# Altium footprint library PcbLib1.PcbLib: 15 footprints
Each footprint in its own frame and in the unit in brackets; x right, y up, seen from the top. Pads: shape width x height; smd on the part's side, far side on the other; paste and mask are expansions set on the pad; w line width, h text height; cw(c..) or ccw(c..) is an arc to the next point about the centre after c.
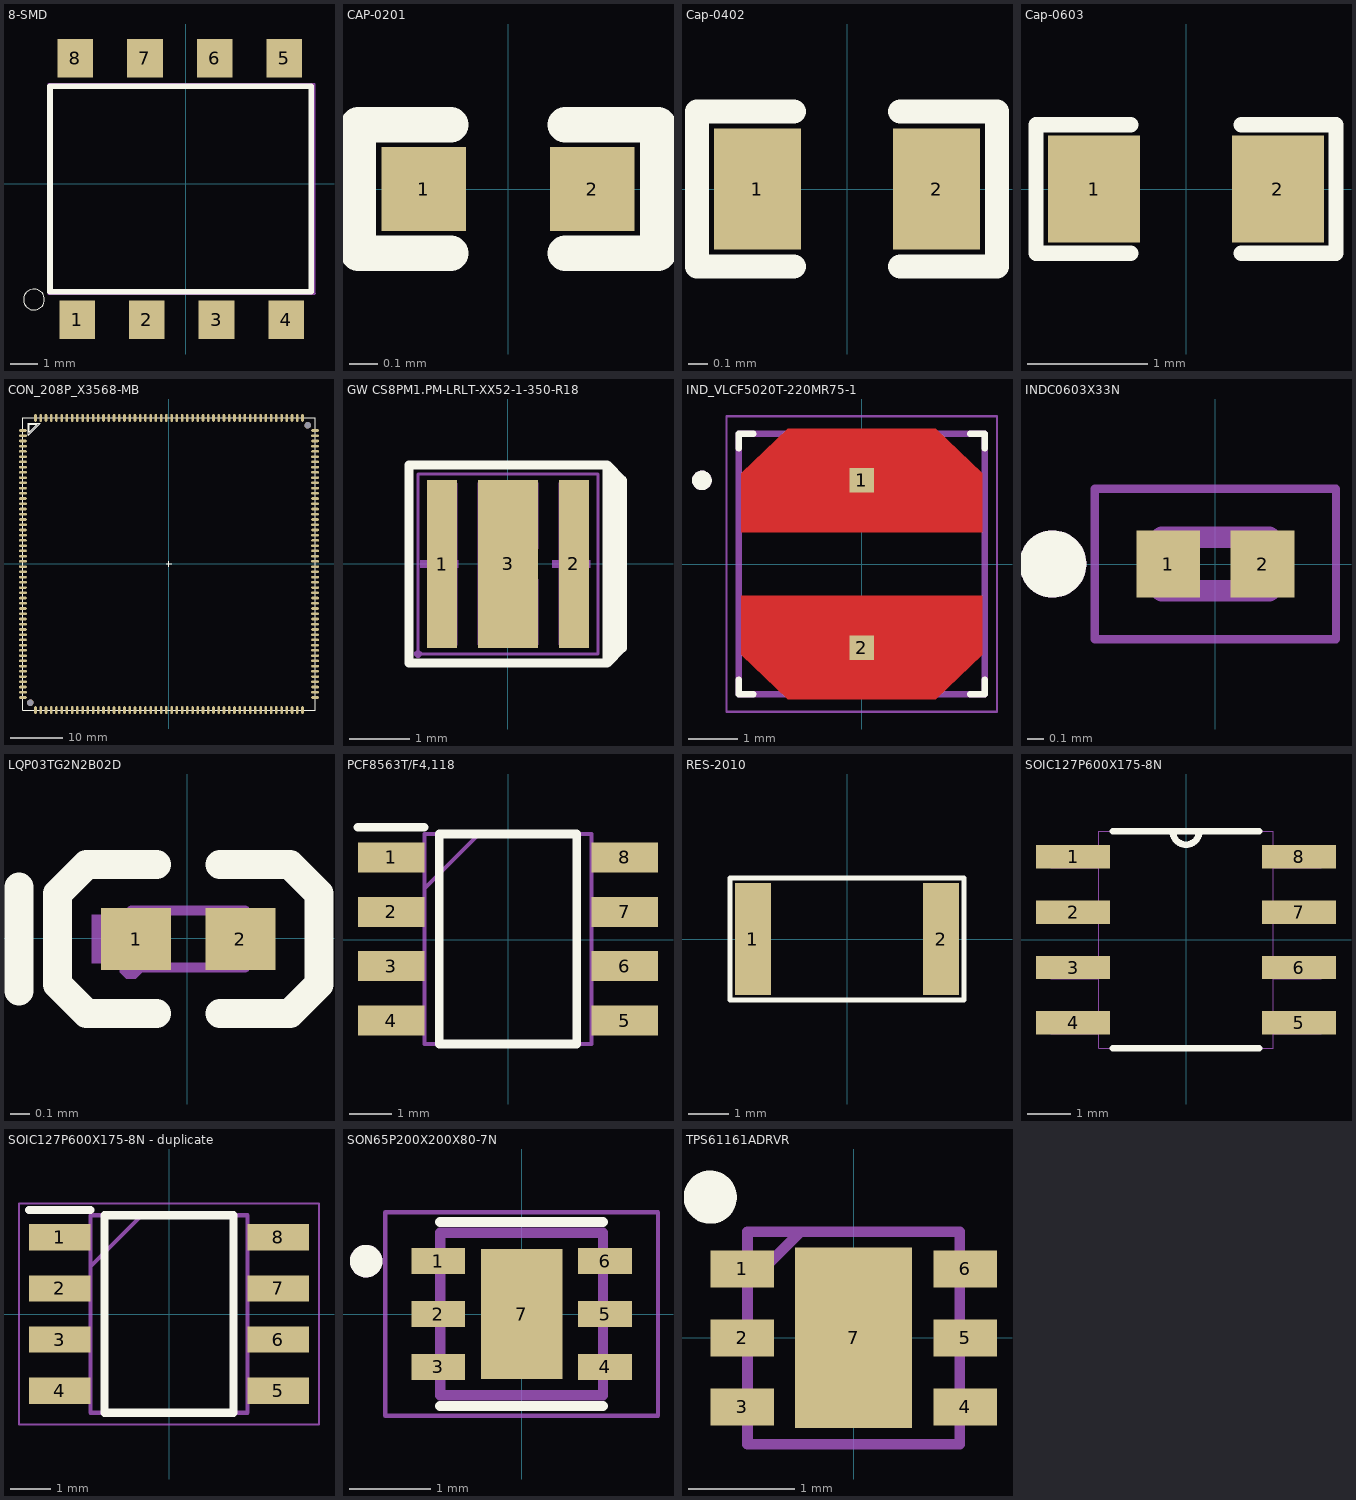
[diagram p0: the footprints below, top view; thin cyan lines are the x and y axes]

## 8-SMD [mm]
pads (8):
  rect 1.3x1.4 smd: 1(-3.96,-4.96) 2(-1.42,-4.96) 3(1.12,-4.96) 4(3.66,-4.96) 5(3.59,4.58) 6(1.05,4.58) 7(-1.49,4.58) 8(-4.03,4.58)
Top Overlay:
  circle w0: c-5.538,-4.221 r0.381
  lines w0.203: -4.953,-3.937 4.572,-3.937 4.572,3.556 -4.953,3.556 -4.953,-3.937
Mechanical 13:
  lines w0.1: 4.68,-3.98 4.68,3.62 -5,3.62 -5,-4 4.69,-4
3D body "step_temp.STEP": height 4.6, standoff 0, extent -4.99,-5.225 4.69,4.935

## CAP-0201 [mm]
pads (2):
  rect 0.3x0.3 smd mask+0.055: 1(-0.3,0) 2(0.3,0)
Top Overlay:
  lines w0.127: -0.203,-0.229 -0.533,-0.229 -0.533,0.229 -0.203,0.229 ; 0.203,-0.229 0.533,-0.229 0.533,0.229 0.203,0.229
3D body "User Library-SMD Ceramic Capacitors_0201 (0603)_AB.STEP": height 0.28, standoff -0.02, extent -0.3,-0.15 0.301,0.15

## Cap-0402 [mil]
pads (2):
  rect 18x25 smd mask+2.36: 1(-18.5,0) 2(18.5,0)
Top Overlay:
  lines w5: -11,-16 -31,-16 -31,16 -11,16 ; 11,-16 31,-16 31,16 11,16
3D body "User Library-Capacitor 0402.step": height 18.5, standoff -1.18, extent -19.68,-9.84 19.7,9.85

## Cap-0603 [mil]
pads (2):
  rect 30x35 smd mask+2.36: 1(-30,0) 2(30,0)
Top Overlay:
  lines w5: -18,-21 -49,-21 -49,21 -18,21 ; 18,-21 49,-21 49,21 18,21
3D body "User Library-CAPC1608X09.step": height 34.25, standoff -1.18, extent -31.51,-15.75 31.49,15.74

## CON_208P_X3568-MB [mm]
height 1
pads (210):
  oval 1.5x0.5 smd: 1(-27.9,25.5) 2(-27.9,24.5) 3(-27.9,23.5) 4(-27.9,22.5) 5(-27.9,21.5) 6(-27.9,20.5) 7(-27.9,19.5) 8(-27.9,18.5) 9(-27.9,17.5) 10(-27.9,16.5) 11(-27.9,15.5) 12(-27.9,14.5) 13(-27.9,13.5) 14(-27.9,12.5) 15(-27.9,11.5) 16(-27.9,10.5) 17(-27.9,9.5) 18(-27.9,8.5) 19(-27.9,7.5) 20(-27.9,6.5) 21(-27.9,5.5) 22(-27.9,4.5) 23(-27.9,3.5) 24(-27.9,2.5) 25(-27.9,1.5) 26(-27.9,0.5) 27(-27.9,-0.5) 28(-27.9,-1.5) 29(-27.9,-2.5) 30(-27.9,-3.5) 31(-27.9,-4.5) 32(-27.9,-5.5) 33(-27.9,-6.5) 34(-27.9,-7.5) 35(-27.9,-8.5) 36(-27.9,-9.5) 37(-27.9,-10.5) 38(-27.9,-11.5) 39(-27.9,-12.5) 40(-27.9,-13.5) 41(-27.9,-14.5) 42(-27.9,-15.5) 43(-27.9,-16.5) 44(-27.9,-17.5) 45(-27.9,-18.5) 46(-27.9,-19.5) 47(-27.9,-20.5) 48(-27.9,-21.5) 49(-27.9,-22.5) 50(-27.9,-23.5) 51(-27.9,-24.5) 52(-27.9,-25.5) 105(27.9,-25.5) 106(27.9,-24.5) 107(27.9,-23.5) 108(27.9,-22.5) 109(27.9,-21.5) 110(27.9,-20.5) 111(27.9,-19.5) 112(27.9,-18.5) 113(27.9,-17.5) 114(27.9,-16.5) 115(27.9,-15.5) 116(27.9,-14.5) 117(27.9,-13.5) 118(27.9,-12.5) 119(27.9,-11.5) 120(27.9,-10.5) 121(27.9,-9.5) 122(27.9,-8.5) 123(27.9,-7.5) 124(27.9,-6.5) 125(27.9,-5.5) 126(27.9,-4.5) 127(27.9,-3.5) 128(27.9,-2.5) 129(27.9,-1.5) 130(27.9,-0.5) 131(27.9,0.5) 132(27.9,1.5) 133(27.9,2.5) 134(27.9,3.5) 135(27.9,4.5) 136(27.9,5.5) 137(27.9,6.5) 138(27.9,7.5) 139(27.9,8.5) 140(27.9,9.5) 141(27.9,10.5) 142(27.9,11.5) 143(27.9,12.5) 144(27.9,13.5) 145(27.9,14.5) 146(27.9,15.5) 147(27.9,16.5) 148(27.9,17.5) 149(27.9,18.5) 150(27.9,19.5) 151(27.9,20.5) 152(27.9,21.5) 153(27.9,22.5) 154(27.9,23.5) 155(27.9,24.5) 156(27.9,25.5)
  oval 0.5x1.5 smd: 53(-25.5,-27.9) 54(-24.5,-27.9) 55(-23.5,-27.9) 56(-22.5,-27.9) 57(-21.5,-27.9) 58(-20.5,-27.9) 59(-19.5,-27.9) 60(-18.5,-27.9) 61(-17.5,-27.9) 62(-16.5,-27.9) 63(-15.5,-27.9) 64(-14.5,-27.9) 65(-13.5,-27.9) 66(-12.5,-27.9) 67(-11.5,-27.9) 68(-10.5,-27.9) 69(-9.5,-27.9) 70(-8.5,-27.9) 71(-7.5,-27.9) 72(-6.5,-27.9) 73(-5.5,-27.9) 74(-4.5,-27.9) 75(-3.5,-27.9) 76(-2.5,-27.9) 77(-1.5,-27.9) 78(-0.5,-27.9) 79(0.5,-27.9) 80(1.5,-27.9) 81(2.5,-27.9) 82(3.5,-27.9) 83(4.5,-27.9) 84(5.5,-27.9) 85(6.5,-27.9) 86(7.5,-27.9) 87(8.5,-27.9) 88(9.5,-27.9) 89(10.5,-27.9) 90(11.5,-27.9) 91(12.5,-27.9) 92(13.5,-27.9) 93(14.5,-27.9) 94(15.5,-27.9) 95(16.5,-27.9) 96(17.5,-27.9) 97(18.5,-27.9) 98(19.5,-27.9) 99(20.5,-27.9) 100(21.5,-27.9) 101(22.5,-27.9) 102(23.5,-27.9) 103(24.5,-27.9) 104(25.5,-27.9) 157(25.5,27.9) 158(24.5,27.9) 159(23.5,27.9) 160(22.5,27.9) 161(21.5,27.9) 162(20.5,27.9) 163(19.5,27.9) 164(18.5,27.9) 165(17.5,27.9) 166(16.5,27.9) 167(15.5,27.9) 168(14.5,27.9) 169(13.5,27.9) 170(12.5,27.9) 171(11.5,27.9) 172(10.5,27.9) 173(9.5,27.9) 174(8.5,27.9) 175(7.5,27.9) 176(6.5,27.9) 177(5.5,27.9) 178(4.5,27.9) 179(3.5,27.9) 180(2.5,27.9) 181(1.5,27.9) 182(0.5,27.9) 183(-0.5,27.9) 184(-1.5,27.9) 185(-2.5,27.9) 186(-3.5,27.9) 187(-4.5,27.9) 188(-5.5,27.9) 189(-6.5,27.9) 190(-7.5,27.9) 191(-8.5,27.9) 192(-9.5,27.9) 193(-10.5,27.9) 194(-11.5,27.9) 195(-12.5,27.9) 196(-13.5,27.9) 197(-14.5,27.9) 198(-15.5,27.9) 199(-16.5,27.9) 200(-17.5,27.9) 201(-18.5,27.9) 202(-19.5,27.9) 203(-20.5,27.9) 204(-21.5,27.9) 205(-22.5,27.9) 206(-23.5,27.9) 207(-24.5,27.9) 208(-25.5,27.9)
  round 1.2 hole 1.2 unplated: 209(26.5,26.5) 210(-26.5,-26.5)
Top Overlay:
  lines w0.2: -0.5,0 0,0 ; 0,-0.5 0,0 ; 0,0.5 0,0 ; 0.5,0 0,0 ; -27.9,-27.9 27.9,-27.9 27.9,27.9 -27.9,27.9 -27.9,-27.9 ; -26.9,24.56 -26.9,26.9 -24.56,26.9 -26.9,24.56 ; -26.646,25.146 -26.646,26.646 -25.146,26.646 -26.646,25.146

## GW CS8PM1.PM-LRLT-XX52-1-350-R18 [mm]
pads (3):
  rect 0.5x2.8 smd paste+0 mask+0.05: 1(-1.095,-0.008) 2(1.105,-0.007)
  rect 1x2.8 smd paste+0 mask+0.05: 3(0.005,-0.008)
Top Overlay:
  region: 1.656,-1.658 1.656,1.643 1.91,1.389 1.91,-1.405
  lines w0.152: 1.656,-1.658 -1.646,-1.658 -1.646,1.644 1.656,1.644 ; 1.656,-1.658 1.656,1.644 ; 1.656,-1.659 1.91,-1.405 1.91,1.389 1.656,1.643
Mechanical 6:
  region: 0.744,0.057 1.379,0.057 1.379,-0.07 0.744,-0.07
  region: -1.202,-0.325 -1.202,0.31 -1.075,0.31 -1.075,-0.325
  region: -1.456,0.056 -0.821,0.056 -0.821,-0.071 -1.456,-0.071
Mechanical 15:
  region: 0.505,-1.358 -0.495,-1.358 -0.495,1.343 0.505,1.343 0.505,0.247 0.386,0.247 0.259,0.12 0.259,-0.007 0.259,-0.134 0.386,-0.261 0.505,-0.261
  region: -0.845,-1.358 -1.345,-1.358 -1.345,1.342 -0.845,1.342
  region: 1.355,-1.357 0.855,-1.357 0.855,1.343 1.355,1.343
  region: -1.435,-1.507 -1.435,-1.483 -1.47,-1.447 -1.52,-1.447 -1.555,-1.483 -1.555,-1.507 -1.555,-1.532 -1.52,-1.568 -1.47,-1.568 -1.435,-1.532
  lines w0.051: -1.495,-1.507 1.505,-1.507 1.505,1.493 -1.495,1.493 -1.495,-1.507
3D body "3D_PCB1_2024-11-08.step": height 2.32, standoff 0, extent -1.527,-1.483 1.483,1.517

## IND_VLCF5020T-220MR75-1 [mm]
height 2
pads (2):
  rect 0.5x0.5 smd paste-1 mask+0: 1(0,1.7) 2(0,-1.7)
Top Layer:
  region: 2.45,-1.85 1.5,-2.75 -1.5,-2.75 -2.45,-1.85 -2.45,-0.65 2.45,-0.65
  region: 2.45,1.85 2.45,0.65 -2.45,0.65 -2.45,1.85 -1.5,2.75 1.5,2.75
Top Overlay:
  circle w0.2: c-3.25,1.7 r0.1
  lines w0.127: -2.5,-2.35 -2.5,-2.65 -2.2,-2.65 ; -2.5,2.35 -2.5,2.65 -2.2,2.65 ; 2.2,-2.65 2.5,-2.65 2.5,-2.35 ; 2.2,2.65 2.5,2.65 2.5,2.35
Top Paste:
  region: 2.45,-1.85 1.5,-2.75 -1.5,-2.75 -2.45,-1.85 -2.45,-0.65 2.45,-0.65
  region: 2.45,1.85 2.45,0.65 -2.45,0.65 -2.45,1.85 -1.5,2.75 1.5,2.75
Top Solder:
  region: 2.55,-1.95 1.6,-2.85 -1.6,-2.85 -2.55,-1.95 -2.55,-0.55 2.55,-0.55
  region: 2.55,1.95 2.55,0.55 -2.55,0.55 -2.55,1.95 -1.6,2.85 1.6,2.85
Mechanical 13:
  circle w0.2: c-3.25,1.7 r0.1
  lines w0.127: -2.5,-2.65 2.5,-2.65 2.5,2.65 -2.5,2.65 -2.5,-2.65
Mechanical 15:
  lines w0.05: -2.75,-3 2.75,-3 2.75,3 -2.75,3 -2.75,-3
3D body "step_temp.STEP": height 2, standoff 0, extent -2.5,-2.5 2.5,2.5

## INDC0603X33N [mm]
pads (2):
  rect 0.38x0.4 smd: 1(-0.281,0) 2(0.281,0)
Top Overlay:
  circle w0.2: c-0.968,0 r0.1
Mechanical 13:
  circle w0.2: c-0.968,0 r0.1
  lines w0.127: -0.32,-0.16 0.32,-0.16 0.32,0.16 -0.32,0.16 -0.32,-0.16
Mechanical 15:
  lines w0.05: -0.718,-0.448 0.718,-0.448 0.718,0.448 -0.718,0.448 -0.718,-0.448

## LQP03TG2N2B02D [mil]
pads (2):
  rect 14.51x12.76 smd paste-3937.01 mask+2: 1(-10.6,-0.2) 2(11,-0.2)
Top Overlay:
  lines w6: -34.8,-11 -34.8,10.6 ; -6.34,-15.58 -20.85,-15.58 -26.85,-9.58 -26.85,9.18 -20.85,15.18 -6.34,15.18 ; 6.74,-15.58 21.25,-15.58 27.25,-9.58 27.25,9.18 21.25,15.18 6.74,15.18
Top Paste:
  region: 3.39,-5.63 3.39,5.23 4.33,6.18 17.3,6.18 18.25,5.23 18.25,-5.63 17.3,-6.58 4.33,-6.58
  region: -2.99,-5.63 -2.99,5.23 -3.93,6.18 -16.9,6.18 -17.85,5.23 -17.85,-5.63 -16.9,-6.58 -3.93,-6.58
Mechanical 1:
Mechanical 6:
  region: -19.8,-5.2 -14.8,-5.2 -14.8,4.8 -19.8,4.8
Mechanical 15:
  region: -11.61,-6.11 -11.61,5.71 -5.71,5.71 -5.71,-6.11
  region: 12.01,-6.11 12.01,5.71 6.11,5.71 6.11,-6.11
  region: -9.25,-6.11 -9.27,-5.15 -10.64,-3.8 -12.57,-3.8 -13.95,-5.14 -13.97,-6.11 -13.95,-7.07 -12.57,-8.42 -10.65,-8.42 -9.27,-7.07
  lines w2: -11.61,-6.11 12.01,-6.11 12.01,5.71 -11.61,5.71 -11.61,-6.11
3D body "LQP03TG2N2B02D.stp": height 12.99, standoff 0, extent -11.91,-6.11 11.71,5.71

## PCF8563T/F4,118 [mm]
pads (8):
  rect 1.55x0.7 smd: 1(-2.73,1.928) 2(-2.73,0.658) 3(-2.73,-0.612) 4(-2.73,-1.882) 5(2.72,-1.882) 6(2.72,-0.612) 7(2.72,0.658) 8(2.72,1.928)
Top Overlay:
  lines w0.2: -3.505,2.628 -1.955,2.628 ; -1.605,-2.427 -1.605,2.473 1.595,2.473 1.595,-2.427 -1.605,-2.427
Mechanical 15:
  lines w0.1: -1.955,1.203 -0.685,2.473 ; -1.955,-2.427 -1.955,2.473 1.945,2.473 1.945,-2.427 -1.955,-2.427
3D body "PCF8563T_F4,118.stp": height 1.44, standoff -0.06, extent -2.997,-2.414 3.003,2.486

## RES-2010 [mm]
pads (2):
  rect 0.9x2.8 smd: 1(-2.35,0) 2(2.35,0)
Top Overlay:
  lines w0.127: -2.921,-1.524 -2.921,1.524 2.921,1.524 2.921,-1.524 -2.921,-1.524
3D body "User Library-R_2010.STEP": height 0.6, standoff 0, extent -2.5,-1.25 2.5,1.25

## SOIC127P600X175-8N [mil]
pads (8):
  rect 67x21 smd: 1(-102,75) 2(-102,25) 3(-102,-25) 4(-102,-75) 5(102,-75) 6(102,-25) 7(102,25) 8(102,75)
Top Overlay:
  lines w6: -66,-98 66,-98 ; -66,98 -12,98 ; 66,98 12,98 ; -12,98 ccw(c0,98) 12,98 ; -12,98 12,98
Mechanical 13:
  lines w0: -12,98 ccw(c0,98) 12,98 ; -12,98 12,98 ; -12,98 -79,98 -79,-98 79,-98 79,98 12,98 ; -122,-85 -122,-65 -79,-65 -79,-85 -122,-85 ; -122,-35 -122,-15 -79,-15 -79,-35 -122,-35 ; -122,15 -122,35 -79,35 -79,15 -122,15 ; -122,65 -122,85 -79,85 -79,65 -122,65 ; 79,-85 79,-65 122,-65 122,-85 79,-85 ; 79,-35 79,-15 122,-15 122,-35 79,-35 ; 79,15 79,35 122,35 122,15 79,15 ; 79,65 79,85 122,85 122,65 79,65
3D body "LM2917MX-8_NOPB.stp": height 64, standoff 0, extent -119.46,-97.7 117.66,95.3

## SOIC127P600X175-8N - duplicate [mm]
pads (8):
  rect 1.528x0.65 smd: 1(-2.711,1.905) 2(-2.711,0.635) 3(-2.711,-0.635) 4(-2.711,-1.905) 5(2.711,-1.905) 6(2.711,-0.635) 7(2.711,0.635) 8(2.711,1.905)
Top Overlay:
  lines w0.2: -3.475,2.58 -1.948,2.58 ; -1.598,-2.452 1.598,-2.452 1.598,2.452 -1.598,2.452 -1.598,-2.452
Mechanical 15:
  lines w0.1: -1.948,1.182 -0.678,2.452 ; -1.948,-2.452 1.948,-2.452 1.948,2.452 -1.948,2.452 -1.948,-2.452
Mechanical 20:
  lines w0.05: -3.725,-2.75 3.725,-2.75 3.725,2.75 -3.725,2.75 -3.725,-2.75

## SON65P200X200X80-7N [mm]
pads (7):
  rect 0.66x0.32 smd: 1(-1.025,0.65) 2(-1.025,0) 3(-1.025,-0.65) 4(1.025,-0.65) 5(1.025,0) 6(1.025,0.65)
  rect 1x1.6 smd paste-2: 7(0,0)
Top Overlay:
  circle w0.2: c-1.91,0.65 r0.1
  lines w0.127: -1,-1.13 1,-1.13 ; -1,1.13 1,1.13
Top Paste:
  region: 0.316,-0.506 -0.316,-0.506 -0.316,0.506 0.316,0.506
Mechanical 13:
  circle w0.2: c-1.91,0.65 r0.1
  lines w0.127: -1,-1 -1,1 1,1 1,-1 -1,-1
Mechanical 15:
  lines w0.05: -1.675,-1.25 -1.675,1.25 1.675,1.25 1.675,-1.25 -1.675,-1.25
3D body "step_temp.STEP": height 0.8, standoff 0, extent -1,-1 1,1

## TPS61161ADRVR [mm]
pads (7):
  rect 0.6x0.35 smd: 1(-1.05,0.65) 2(-1.05,0) 3(-1.05,-0.65) 4(1.05,-0.65) 5(1.05,0) 6(1.05,0.65)
  rect 1.1x1.7 smd: 7(0,0)
Top Overlay:
  circle w0.25: c-1.35,1.325 r0.125
Mechanical 15:
  lines w0.1: -1,0.5 -0.5,1 ; -1,-1 1,-1 1,1 -1,1 -1,-1
3D body "TPS61161ADRVR.stp": height 0.8, standoff 0, extent -1.05,-1 1.05,1